# EAGLE library part MLPF-WB-02D3 (library MLPF-WB-02D3)
2.4 GHz low pass filter matched to STM32WB5x and STM32WB1x in WLCSP and UFBGA packages Source: Datasheet <https://www.st.com/resource/en/datasheet/mlpf-wb-02d3.pdf>
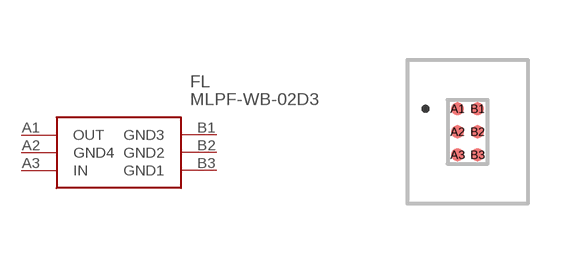
[diagram p0: symbol with the pads of CSPG_2025; footprint CSPG_2025]

Designator prefix FL

## MLPF-WB-02D3 (Description: 2.4 GHz low pass filter matched to STM32WB5x and STM32WB1x in WLCSP and UFBGA packages; Height: mm; Manufacturer_Name: STMicroelectronics; Manufacturer_Part_Number: MLPF-WB-02D3; Mouser_Part_Number: 511-MLPF-WB-02D3; Mouser_Price-Stock: https://www.mouser.co.uk/ProductDetail/STMicroelectronics/MLPF-WB-02D3?qs=T%252BzbugeAwjhlflKeEN03Bg%3D%3D)  [CSPG_2025]
A1  OUT
A2  GND4
A3  IN
B1  GND3
B2  GND2
B3  GND1

## Footprint CSPG_2025 (pad centres in mm)
CSPG_2025
smd 0.32 x 0.32: A1 -0.25,0.577; A2 -0.25,0; A3 -0.25,-0.577; B1 0.25,0.577; B2 0.25,0; B3 0.25,-0.577